# Altium schematic symbol library ATMEGA328P-MU.SchLib: 1 symbol
Pins are listed as number, name and electrical type; pins without a type are passive.

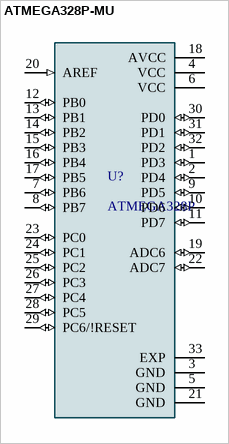
[diagram p0: symbol ATMEGA328P-MU]

## ATMEGA328P-MU
designator U?, comment ATMEGA328P
AVR ATmega Microcontroller IC 8-Bit 20MHz 32KB (16K x 16) FLASH 32-VQFN (5x5); MF: Microchip; MP: ATMEGA328P-MU; Value: *; Package: VQFN-32 Microchip; Price: None; Availability: Good; SnapEDA_Link: https://www.snapeda.com/parts/ATMEGA328P-MU/Microchip/view-part/649548/?ref=snap; Check_prices: https://www.snapeda.com/parts/ATMEGA328P-MU/Microchip/view-part/649548/?ref=eda; Purchase-URL: https://pricing.snapeda.com/search/part/ATMEGA328P-MU/?ref=eda
footprint ATMEGA328P-MU (AVR ATmega Microcontroller IC 8-Bit 20MHz 32KB (16K x 16) FLASH 32-VQFN (5x5))
pins: 1 PD3 (io), 2 PD4 (io), 3 GND (power), 4 VCC (power), 5 GND (power), 6 VCC (power), 7 PB6 (io), 8 PB7 (io), 9 PD5 (io), 10 PD6 (io), 11 PD7 (io), 12 PB0 (io), 13 PB1 (io), 14 PB2 (io), 15 PB3 (io), 16 PB4 (io), 17 PB5 (io), 18 AVCC (power), 19 ADC6 (io), 20 AREF (in), 21 GND (power), 22 ADC7 (io), 23 PC0 (io), 24 PC1 (io), 25 PC2 (io), 26 PC3 (io), 27 PC4 (io), 28 PC5 (io), 29 PC6/!RESET (io), 30 PD0 (io), 31 PD1 (io), 32 PD2 (io), 33 EXP (power)